# Altium schematic symbol library WR-TBL_Pluggable Connector.SchLib: 879 symbols (part 12 of 15)
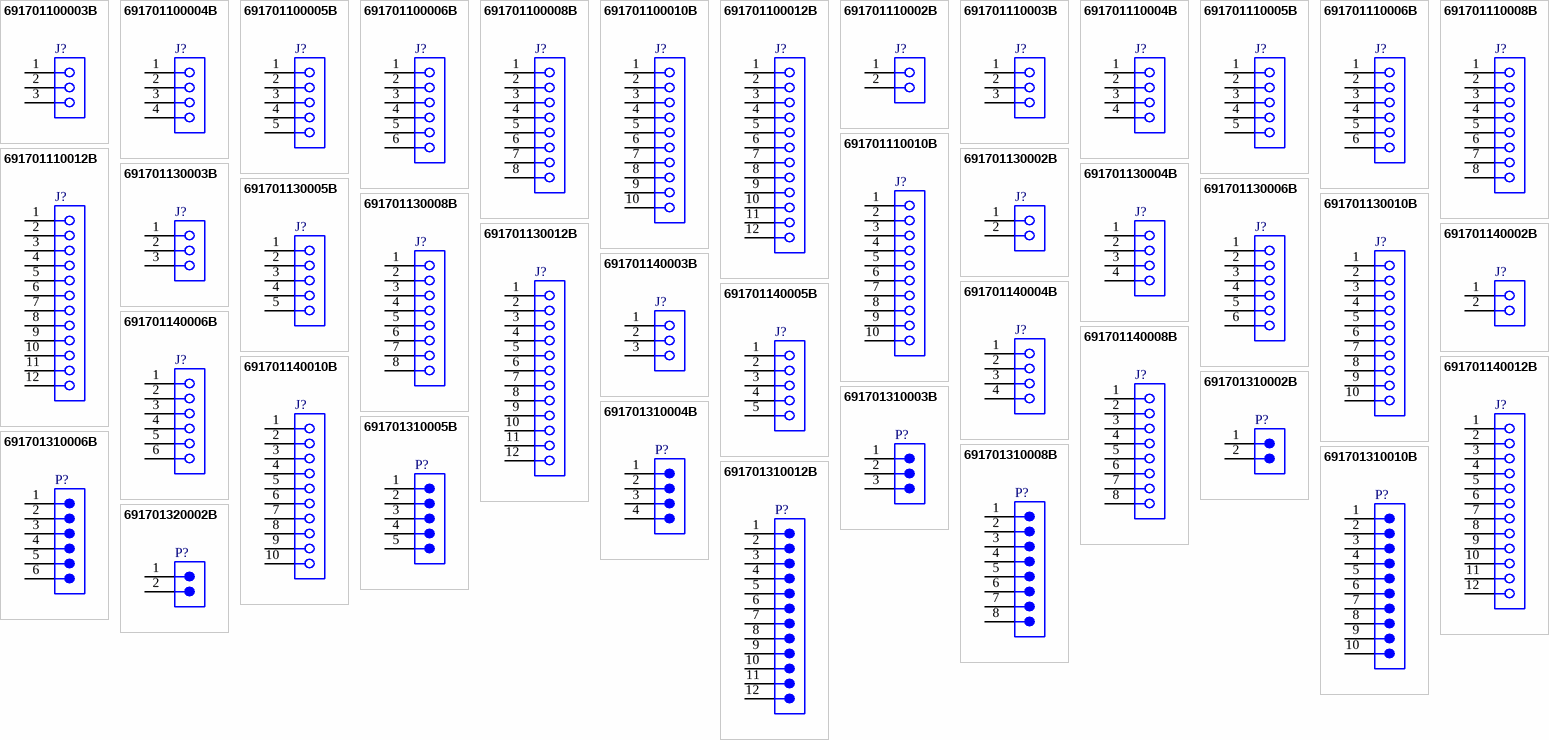
[diagram p32: symbols 691701100003B to 691701320002B]

## 691701130002B
designator J?  (value not drawn)
WR-TBL Series 7011B Vertical PCB Header with Flanges, THR, pitch 3.5mm, 02p; Manufacturer: Wurth Elektronik; Insulator Material: LCP; Rated Current (cULus): 10A; Rated Current (VDE): 8A; Working Voltage (cULus): 300V (AC); Working Voltage (VDE): 250V (AC); Withstanding Voltage (cULus): 1600V (AC); Withstanding Voltage (VDE): 1400V (AC); Manufacturer Part Number: 691701130002B; Product Series: WR-TBL; ComponentLink1Description: Website Link; ComponentLink1URL: https://www.we-online.com; ComponentLink2Description: Datasheet Link; ComponentLink2URL: https://www.we-online.com/components/products/datasheet/691701130002B; Mount: Through Hole Reflow; Operating Temperature Min: -40degC; Operating Temperature Max: 130degC; Packaging: Tape and Reel; Application: Pluggable; Number of Pins: 2; Number of Rows: 1; Orientation: Vertical; Lead Pitch: 3.5mm
footprint 691701130002B
pins: 1, 2

## 691701130003B
designator J?  (value not drawn)
WR-TBL Series 7011B Vertical PCB Header with Flanges, THR, pitch 3.5mm, 03p; Manufacturer: Wurth Elektronik; Insulator Material: LCP; Rated Current (cULus): 10A; Rated Current (VDE): 8A; Working Voltage (cULus): 300V (AC); Working Voltage (VDE): 250V (AC); Withstanding Voltage (cULus): 1600V (AC); Withstanding Voltage (VDE): 1400V (AC); Manufacturer Part Number: 691701130003B; Product Series: WR-TBL; ComponentLink1Description: Website Link; ComponentLink1URL: https://www.we-online.com; ComponentLink2Description: Datasheet Link; ComponentLink2URL: https://www.we-online.com/components/products/datasheet/691701130003B; Mount: Through Hole Reflow; Operating Temperature Min: -40degC; Operating Temperature Max: 130degC; Packaging: Tape and Reel; Application: Pluggable; Number of Pins: 3; Number of Rows: 1; Orientation: Vertical; Lead Pitch: 3.5mm
footprint 691701130003B
pins: 1, 2, 3

## 691701130004B
designator J?  (value not drawn)
WR-TBL Series 7011B Vertical PCB Header with Flanges, THR, pitch 3.5mm, 04p; Manufacturer: Wurth Elektronik; Insulator Material: LCP; Rated Current (cULus): 10A; Rated Current (VDE): 8A; Working Voltage (cULus): 300V (AC); Working Voltage (VDE): 250V (AC); Withstanding Voltage (cULus): 1600V (AC); Withstanding Voltage (VDE): 1400V (AC); Manufacturer Part Number: 691701130004B; Product Series: WR-TBL; ComponentLink1Description: Website Link; ComponentLink1URL: https://www.we-online.com; ComponentLink2Description: Datasheet Link; ComponentLink2URL: https://www.we-online.com/components/products/datasheet/691701130004B; Mount: Through Hole Reflow; Operating Temperature Min: -40degC; Operating Temperature Max: 130degC; Packaging: Tape and Reel; Application: Pluggable; Number of Pins: 4; Number of Rows: 1; Orientation: Vertical; Lead Pitch: 3.5mm
footprint 691701130004B
pins: 1, 2, 3, 4

## 691701130005B
designator J?  (value not drawn)
WR-TBL Series 7011B Vertical PCB Header with Flanges, THR, pitch 3.5mm, 05p; Manufacturer: Wurth Elektronik; Insulator Material: LCP; Rated Current (cULus): 10A; Rated Current (VDE): 8A; Working Voltage (cULus): 300V (AC); Working Voltage (VDE): 250V (AC); Withstanding Voltage (cULus): 1600V (AC); Withstanding Voltage (VDE): 1400V (AC); Manufacturer Part Number: 691701130005B; Product Series: WR-TBL; ComponentLink1Description: Website Link; ComponentLink1URL: https://www.we-online.com; ComponentLink2Description: Datasheet Link; ComponentLink2URL: https://www.we-online.com/components/products/datasheet/691701130005B; Mount: Through Hole Reflow; Operating Temperature Min: -40degC; Operating Temperature Max: 130degC; Packaging: Tape and Reel; Application: Pluggable; Number of Pins: 5; Number of Rows: 1; Orientation: Vertical; Lead Pitch: 3.5mm
footprint 691701130005B
pins: 1, 2, 3, 4, 5

## 691701130006B
designator J?  (value not drawn)
WR-TBL Series 7011B Vertical PCB Header with Flanges, THR, pitch 3.5mm, 06p; Manufacturer: Wurth Elektronik; Insulator Material: LCP; Rated Current (cULus): 10A; Rated Current (VDE): 8A; Working Voltage (cULus): 300V (AC); Working Voltage (VDE): 250V (AC); Withstanding Voltage (cULus): 1600V (AC); Withstanding Voltage (VDE): 1400V (AC); Manufacturer Part Number: 691701130006B; Product Series: WR-TBL; ComponentLink1Description: Website Link; ComponentLink1URL: https://www.we-online.com; ComponentLink2Description: Datasheet Link; ComponentLink2URL: https://www.we-online.com/components/products/datasheet/691701130006B; Mount: Through Hole Reflow; Operating Temperature Min: -40degC; Operating Temperature Max: 130degC; Packaging: Tape and Reel; Application: Pluggable; Number of Pins: 6; Number of Rows: 1; Orientation: Vertical; Lead Pitch: 3.5mm
footprint 691701130006B
pins: 1, 2, 3, 4, 5, 6

## 691701130008B
designator J?  (value not drawn)
WR-TBL Series 7011B Vertical PCB Header with Flanges, THR, pitch 3.5mm, 08p; Manufacturer: Wurth Elektronik; Insulator Material: LCP; Rated Current (cULus): 10A; Rated Current (VDE): 8A; Working Voltage (cULus): 300V (AC); Working Voltage (VDE): 250V (AC); Withstanding Voltage (cULus): 1600V (AC); Withstanding Voltage (VDE): 1400V (AC); Manufacturer Part Number: 691701130008B; Product Series: WR-TBL; ComponentLink1Description: Website Link; ComponentLink1URL: https://www.we-online.com; ComponentLink2Description: Datasheet Link; ComponentLink2URL: https://www.we-online.com/components/products/datasheet/691701130008B; Mount: Through Hole Reflow; Operating Temperature Min: -40degC; Operating Temperature Max: 130degC; Packaging: Tape and Reel; Application: Pluggable; Number of Pins: 8; Number of Rows: 1; Orientation: Vertical; Lead Pitch: 3.5mm
footprint 691701130008B
pins: 1, 2, 3, 4, 5, 6, 7, 8

## 691701130010B
designator J?  (value not drawn)
WR-TBL Series 7011B Vertical PCB Header with Flanges, THR, pitch 3.5mm, 10p; Manufacturer: Wurth Elektronik; Insulator Material: LCP; Rated Current (cULus): 10A; Rated Current (VDE): 8A; Working Voltage (cULus): 300V (AC); Working Voltage (VDE): 250V (AC); Withstanding Voltage (cULus): 1600V (AC); Withstanding Voltage (VDE): 1400V (AC); Manufacturer Part Number: 691701130010B; Product Series: WR-TBL; ComponentLink1Description: Website Link; ComponentLink1URL: https://www.we-online.com; ComponentLink2Description: Datasheet Link; ComponentLink2URL: https://www.we-online.com/components/products/datasheet/691701130010B; Mount: Through Hole Reflow; Operating Temperature Min: -40degC; Operating Temperature Max: 130degC; Packaging: Tape and Reel; Application: Pluggable; Number of Pins: 10; Number of Rows: 1; Orientation: Vertical; Lead Pitch: 3.5mm
footprint 691701130010B
pins: 1, 2, 3, 4, 5, 6, 7, 8, 9, 10

## 691701130012B
designator J?  (value not drawn)
WR-TBL Series 7011B Vertical PCB Header with Flanges, THR, pitch 3.5mm, 12p; Manufacturer: Wurth Elektronik; Insulator Material: LCP; Rated Current (cULus): 10A; Rated Current (VDE): 8A; Working Voltage (cULus): 300V (AC); Working Voltage (VDE): 250V (AC); Withstanding Voltage (cULus): 1600V (AC); Withstanding Voltage (VDE): 1400V (AC); Manufacturer Part Number: 691701130012B; Product Series: WR-TBL; ComponentLink1Description: Website Link; ComponentLink1URL: https://www.we-online.com; ComponentLink2Description: Datasheet Link; ComponentLink2URL: https://www.we-online.com/components/products/datasheet/691701130012B; Mount: Through Hole Reflow; Operating Temperature Min: -40degC; Operating Temperature Max: 130degC; Packaging: Tape and Reel; Application: Pluggable; Number of Pins: 12; Number of Rows: 1; Orientation: Vertical; Lead Pitch: 3.5mm
footprint 691701130012B
pins: 1, 2, 3, 4, 5, 6, 7, 8, 9, 10, 11, 12

## 691701140002B
designator J?  (value not drawn)
WR-TBL Series 7011B Horizontal PCB Header with Flanges, THR, pitch 3.5mm, 02p; Manufacturer: Wurth Elektronik; Insulator Material: LCP; Rated Current (cULus): 10A; Rated Current (VDE): 8A; Working Voltage (cULus): 300V (AC); Working Voltage (VDE): 250V (AC); Withstanding Voltage (cULus): 1600V (AC); Withstanding Voltage (VDE): 1400V (AC); Manufacturer Part Number: 691701140002B; Product Series: WR-TBL; ComponentLink1Description: Website Link; ComponentLink1URL: https://www.we-online.com; ComponentLink2Description: Datasheet Link; ComponentLink2URL: https://www.we-online.com/components/products/datasheet/691701140002B; Mount: Through Hole Reflow; Operating Temperature Min: -40degC; Operating Temperature Max: 130degC; Packaging: Tape and Reel; Application: Pluggable; Number of Pins: 2; Number of Rows: 1; Orientation: Horizontal; Lead Pitch: 3.5mm
footprint 691701140002B
pins: 1, 2

## 691701140003B
designator J?  (value not drawn)
WR-TBL Series 7011B Horizontal PCB Header with Flanges, THR, pitch 3.5mm, 03p; Manufacturer: Wurth Elektronik; Insulator Material: LCP; Rated Current (cULus): 10A; Rated Current (VDE): 8A; Working Voltage (cULus): 300V (AC); Working Voltage (VDE): 250V (AC); Withstanding Voltage (cULus): 1600V (AC); Withstanding Voltage (VDE): 1400V (AC); Manufacturer Part Number: 691701140003B; Product Series: WR-TBL; ComponentLink1Description: Website Link; ComponentLink1URL: https://www.we-online.com; ComponentLink2Description: Datasheet Link; ComponentLink2URL: https://www.we-online.com/components/products/datasheet/691701140003B; Mount: Through Hole Reflow; Operating Temperature Min: -40degC; Operating Temperature Max: 130degC; Packaging: Tape and Reel; Application: Pluggable; Number of Pins: 3; Number of Rows: 1; Orientation: Horizontal; Lead Pitch: 3.5mm
footprint 691701140003B
pins: 1, 2, 3

## 691701140004B
designator J?  (value not drawn)
WR-TBL Series 7011B Horizontal PCB Header with Flanges, THR, pitch 3.5mm, 04p; Manufacturer: Wurth Elektronik; Insulator Material: LCP; Rated Current (cULus): 10A; Rated Current (VDE): 8A; Working Voltage (cULus): 300V (AC); Working Voltage (VDE): 250V (AC); Withstanding Voltage (cULus): 1600V (AC); Withstanding Voltage (VDE): 1400V (AC); Manufacturer Part Number: 691701140004B; Product Series: WR-TBL; ComponentLink1Description: Website Link; ComponentLink1URL: https://www.we-online.com; ComponentLink2Description: Datasheet Link; ComponentLink2URL: https://www.we-online.com/components/products/datasheet/691701140004B; Mount: Through Hole Reflow; Operating Temperature Min: -40degC; Operating Temperature Max: 130degC; Packaging: Tape and Reel; Application: Pluggable; Number of Pins: 4; Number of Rows: 1; Orientation: Horizontal; Lead Pitch: 3.5mm
footprint 691701140004B
pins: 1, 2, 3, 4

## 691701140005B
designator J?  (value not drawn)
WR-TBL Series 7011B Horizontal PCB Header with Flanges, THR, pitch 3.5mm, 05p; Manufacturer: Wurth Elektronik; Insulator Material: LCP; Rated Current (cULus): 10A; Rated Current (VDE): 8A; Working Voltage (cULus): 300V (AC); Working Voltage (VDE): 250V (AC); Withstanding Voltage (cULus): 1600V (AC); Withstanding Voltage (VDE): 1400V (AC); Manufacturer Part Number: 691701140005B; Product Series: WR-TBL; ComponentLink1Description: Website Link; ComponentLink1URL: https://www.we-online.com; ComponentLink2Description: Datasheet Link; ComponentLink2URL: https://www.we-online.com/components/products/datasheet/691701140005B; Mount: Through Hole Reflow; Operating Temperature Min: -40degC; Operating Temperature Max: 130degC; Packaging: Tape and Reel; Application: Pluggable; Number of Pins: 5; Number of Rows: 1; Orientation: Horizontal; Lead Pitch: 3.5mm
footprint 691701140005B
pins: 1, 2, 3, 4, 5

## 691701140006B
designator J?  (value not drawn)
WR-TBL Series 7011B Horizontal PCB Header with Flanges, THR, pitch 3.5mm, 06p; Manufacturer: Wurth Elektronik; Insulator Material: LCP; Rated Current (cULus): 10A; Rated Current (VDE): 8A; Working Voltage (cULus): 300V (AC); Working Voltage (VDE): 250V (AC); Withstanding Voltage (cULus): 1600V (AC); Withstanding Voltage (VDE): 1400V (AC); Manufacturer Part Number: 691701140006B; Product Series: WR-TBL; ComponentLink1Description: Website Link; ComponentLink1URL: https://www.we-online.com; ComponentLink2Description: Datasheet Link; ComponentLink2URL: https://www.we-online.com/components/products/datasheet/691701140006B; Mount: Through Hole Reflow; Operating Temperature Min: -40degC; Operating Temperature Max: 130degC; Packaging: Tape and Reel; Application: Pluggable; Number of Pins: 6; Number of Rows: 1; Orientation: Horizontal; Lead Pitch: 3.5mm
footprint 691701140006B
pins: 1, 2, 3, 4, 5, 6

## 691701140008B
designator J?  (value not drawn)
WR-TBL Series 7011B Horizontal PCB Header with Flanges, THR, pitch 3.5mm, 08p; Manufacturer: Wurth Elektronik; Insulator Material: LCP; Rated Current (cULus): 10A; Rated Current (VDE): 8A; Working Voltage (cULus): 300V (AC); Working Voltage (VDE): 250V (AC); Withstanding Voltage (cULus): 1600V (AC); Withstanding Voltage (VDE): 1400V (AC); Manufacturer Part Number: 691701140008B; Product Series: WR-TBL; ComponentLink1Description: Website Link; ComponentLink1URL: https://www.we-online.com; ComponentLink2Description: Datasheet Link; ComponentLink2URL: https://www.we-online.com/components/products/datasheet/691701140008B; Mount: Through Hole Reflow; Operating Temperature Min: -40degC; Operating Temperature Max: 130degC; Packaging: Tape and Reel; Application: Pluggable; Number of Pins: 8; Number of Rows: 1; Orientation: Horizontal; Lead Pitch: 3.5mm
footprint 691701140008B
pins: 1, 2, 3, 4, 5, 6, 7, 8

## 691701140010B
designator J?  (value not drawn)
WR-TBL Series 7011B Horizontal PCB Header with Flanges, THR, pitch 3.5mm, 10p; Manufacturer: Wurth Elektronik; Insulator Material: LCP; Rated Current (cULus): 10A; Rated Current (VDE): 8A; Working Voltage (cULus): 300V (AC); Working Voltage (VDE): 250V (AC); Withstanding Voltage (cULus): 1600V (AC); Withstanding Voltage (VDE): 1400V (AC); Manufacturer Part Number: 691701140010B; Product Series: WR-TBL; ComponentLink1Description: Website Link; ComponentLink1URL: https://www.we-online.com; ComponentLink2Description: Datasheet Link; ComponentLink2URL: https://www.we-online.com/components/products/datasheet/691701140010B; Mount: Through Hole Reflow; Operating Temperature Min: -40degC; Operating Temperature Max: 130degC; Packaging: Tape and Reel; Application: Pluggable; Number of Pins: 10; Number of Rows: 1; Orientation: Horizontal; Lead Pitch: 3.5mm
footprint 691701140010B
pins: 1, 2, 3, 4, 5, 6, 7, 8, 9, 10

## 691701140012B
designator J?  (value not drawn)
WR-TBL Series 7011B Horizontal PCB Header with Flanges, THR, pitch 3.5mm, 12p; Manufacturer: Wurth Elektronik; Insulator Material: LCP; Rated Current (cULus): 10A; Rated Current (VDE): 8A; Working Voltage (cULus): 300V (AC); Working Voltage (VDE): 250V (AC); Withstanding Voltage (cULus): 1600V (AC); Withstanding Voltage (VDE): 1400V (AC); Manufacturer Part Number: 691701140012B; Product Series: WR-TBL; ComponentLink1Description: Website Link; ComponentLink1URL: https://www.we-online.com; ComponentLink2Description: Datasheet Link; ComponentLink2URL: https://www.we-online.com/components/products/datasheet/691701140012B; Mount: Through Hole Reflow; Operating Temperature Min: -40degC; Operating Temperature Max: 130degC; Packaging: Tape and Reel; Application: Pluggable; Number of Pins: 12; Number of Rows: 1; Orientation: Horizontal; Lead Pitch: 3.5mm
footprint 691701140012B
pins: 1, 2, 3, 4, 5, 6, 7, 8, 9, 10, 11, 12

## 691701310002B
designator P?  (value not drawn)
WR-TBL Series 7013B Vertical PCB Header, SMT, pitch 3.81mm, 02p; Manufacturer: Wurth Elektronik; Insulator Material: LCP; Modularity: No; Rated Current (cULus): 10A; Rated Current (VDE): 8A; Working Voltage (cULus): 300V (AC); Working Voltage (VDE): 250V (AC); Withstanding Voltage (cULus): 1600V (AC); Withstanding Voltage (VDE): 1400V (AC); Manufacturer Part Number: 691701310002B; Product Series: WR-TBL; ComponentLink1Description: Website Link; ComponentLink1URL: https://www.we-online.com; ComponentLink2Description: Datasheet Link; ComponentLink2URL: https://www.we-online.com/components/products/datasheet/691701310002B; Mount: Surface Mount; Operating Temperature Min: -40degC; Operating Temperature Max: 130degC; Packaging: Box; Application: Pluggable; Number of Pins: 2; Number of Rows: 1; Orientation: Vertical; Lead Pitch: 3.81mm
footprint 691701310002B
pins: 1, 2

## 691701310003B
designator P?  (value not drawn)
WR-TBL Series 7013B Vertical PCB Header, SMT, pitch 3.81mm, 03p; Manufacturer: Wurth Elektronik; Insulator Material: LCP; Modularity: No; Rated Current (cULus): 10A; Rated Current (VDE): 8A; Working Voltage (cULus): 300V (AC); Working Voltage (VDE): 250V (AC); Withstanding Voltage (cULus): 1600V (AC); Withstanding Voltage (VDE): 1400V (AC); Manufacturer Part Number: 691701310003B; Product Series: WR-TBL; ComponentLink1Description: Website Link; ComponentLink1URL: https://www.we-online.com; ComponentLink2Description: Datasheet Link; ComponentLink2URL: https://www.we-online.com/components/products/datasheet/691701310003B; Mount: Surface Mount; Operating Temperature Min: -40degC; Operating Temperature Max: 130degC; Packaging: Box; Application: Pluggable; Number of Pins: 3; Number of Rows: 1; Orientation: Vertical; Lead Pitch: 3.81mm
footprint 691701310003B
pins: 1, 2, 3

## 691701310004B
designator P?  (value not drawn)
WR-TBL Series 7013B Vertical PCB Header, SMT, pitch 3.81mm, 04p; Manufacturer: Wurth Elektronik; Insulator Material: LCP; Modularity: No; Rated Current (cULus): 10A; Rated Current (VDE): 8A; Working Voltage (cULus): 300V (AC); Working Voltage (VDE): 250V (AC); Withstanding Voltage (cULus): 1600V (AC); Withstanding Voltage (VDE): 1400V (AC); Manufacturer Part Number: 691701310004B; Product Series: WR-TBL; ComponentLink1Description: Website Link; ComponentLink1URL: https://www.we-online.com; ComponentLink2Description: Datasheet Link; ComponentLink2URL: https://www.we-online.com/components/products/datasheet/691701310004B; Mount: Surface Mount; Operating Temperature Min: -40degC; Operating Temperature Max: 130degC; Packaging: Box; Application: Pluggable; Number of Pins: 4; Number of Rows: 1; Orientation: Vertical; Lead Pitch: 3.81mm
footprint 691701310004B
pins: 1, 2, 3, 4

## 691701310005B
designator P?  (value not drawn)
WR-TBL Series 7013B Vertical PCB Header, SMT, pitch 3.81mm, 05p; Manufacturer: Wurth Elektronik; Insulator Material: LCP; Modularity: No; Rated Current (cULus): 10A; Rated Current (VDE): 8A; Working Voltage (cULus): 300V (AC); Working Voltage (VDE): 250V (AC); Withstanding Voltage (cULus): 1600V (AC); Withstanding Voltage (VDE): 1400V (AC); Manufacturer Part Number: 691701310005B; Product Series: WR-TBL; ComponentLink1Description: Website Link; ComponentLink1URL: https://www.we-online.com; ComponentLink2Description: Datasheet Link; ComponentLink2URL: https://www.we-online.com/components/products/datasheet/691701310005B; Mount: Surface Mount; Operating Temperature Min: -40degC; Operating Temperature Max: 130degC; Packaging: Box; Application: Pluggable; Number of Pins: 5; Number of Rows: 1; Orientation: Vertical; Lead Pitch: 3.81mm
footprint 691701310005B
pins: 1, 2, 3, 4, 5

## 691701310006B
designator P?  (value not drawn)
WR-TBL Series 7013B Vertical PCB Header, SMT, pitch 3.81mm, 06p; Manufacturer: Wurth Elektronik; Insulator Material: LCP; Modularity: No; Rated Current (cULus): 10A; Rated Current (VDE): 8A; Working Voltage (cULus): 300V (AC); Working Voltage (VDE): 250V (AC); Withstanding Voltage (cULus): 1600V (AC); Withstanding Voltage (VDE): 1400V (AC); Manufacturer Part Number: 691701310006B; Product Series: WR-TBL; ComponentLink1Description: Website Link; ComponentLink1URL: https://www.we-online.com; ComponentLink2Description: Datasheet Link; ComponentLink2URL: https://www.we-online.com/components/products/datasheet/691701310006B; Mount: Surface Mount; Operating Temperature Min: -40degC; Operating Temperature Max: 130degC; Packaging: Box; Application: Pluggable; Number of Pins: 6; Number of Rows: 1; Orientation: Vertical; Lead Pitch: 3.81mm
footprint 691701310006B
pins: 1, 2, 3, 4, 5, 6

## 691701310008B
designator P?  (value not drawn)
WR-TBL Series 7013B Vertical PCB Header, SMT, pitch 3.81mm, 08p; Manufacturer: Wurth Elektronik; Insulator Material: LCP; Modularity: No; Rated Current (cULus): 10A; Rated Current (VDE): 8A; Working Voltage (cULus): 300V (AC); Working Voltage (VDE): 250V (AC); Withstanding Voltage (cULus): 1600V (AC); Withstanding Voltage (VDE): 1400V (AC); Manufacturer Part Number: 691701310008B; Product Series: WR-TBL; ComponentLink1Description: Website Link; ComponentLink1URL: https://www.we-online.com; ComponentLink2Description: Datasheet Link; ComponentLink2URL: https://www.we-online.com/components/products/datasheet/691701310008B; Mount: Surface Mount; Operating Temperature Min: -40degC; Operating Temperature Max: 130degC; Packaging: Box; Application: Pluggable; Number of Pins: 8; Number of Rows: 1; Orientation: Vertical; Lead Pitch: 3.81mm
footprint 691701310008B
pins: 1, 2, 3, 4, 5, 6, 7, 8

## 691701310010B
designator P?  (value not drawn)
WR-TBL Series 7013B Vertical PCB Header, SMT, pitch 3.81mm, 10p; Manufacturer: Wurth Elektronik; Insulator Material: LCP; Modularity: No; Rated Current (cULus): 10A; Rated Current (VDE): 8A; Working Voltage (cULus): 300V (AC); Working Voltage (VDE): 250V (AC); Withstanding Voltage (cULus): 1600V (AC); Withstanding Voltage (VDE): 1400V (AC); Manufacturer Part Number: 691701310010B; Product Series: WR-TBL; ComponentLink1Description: Website Link; ComponentLink1URL: https://www.we-online.com; ComponentLink2Description: Datasheet Link; ComponentLink2URL: https://www.we-online.com/components/products/datasheet/691701310010B; Mount: Surface Mount; Operating Temperature Min: -40degC; Operating Temperature Max: 130degC; Packaging: Box; Application: Pluggable; Number of Pins: 10; Number of Rows: 1; Orientation: Vertical; Lead Pitch: 3.81mm
footprint 691701310010B
pins: 1, 2, 3, 4, 5, 6, 7, 8, 9, 10

## 691701310012B
designator P?  (value not drawn)
WR-TBL Series 7013B Vertical PCB Header, SMT, pitch 3.81mm, 12p; Manufacturer: Wurth Elektronik; Insulator Material: LCP; Modularity: No; Rated Current (cULus): 10A; Rated Current (VDE): 8A; Working Voltage (cULus): 300V (AC); Working Voltage (VDE): 250V (AC); Withstanding Voltage (cULus): 1600V (AC); Withstanding Voltage (VDE): 1400V (AC); Manufacturer Part Number: 691701310012B; Product Series: WR-TBL; ComponentLink1Description: Website Link; ComponentLink1URL: https://www.we-online.com; ComponentLink2Description: Datasheet Link; ComponentLink2URL: https://www.we-online.com/components/products/datasheet/691701310012B; Mount: Surface Mount; Operating Temperature Min: -40degC; Operating Temperature Max: 130degC; Packaging: Box; Application: Pluggable; Number of Pins: 12; Number of Rows: 1; Orientation: Vertical; Lead Pitch: 3.81mm
footprint 691701310012B
pins: 1, 2, 3, 4, 5, 6, 7, 8, 9, 10, 11, 12

## 691701320002B
designator P?  (value not drawn)
WR-TBL Series 7013 Vertical PCB Header with Flanges, SMT, pitch 3.81mm, 02p; Manufacturer: Wurth Elektronik; Insulator Material: LCP; Modularity: No; Rated Current (cULus): 10A; Rated Current (VDE): 8A; Working Voltage (cULus): 300V (AC); Working Voltage (VDE): 250V (AC); Withstanding Voltage (cULus): 1600V (AC); Withstanding Voltage (VDE): 1400V (AC); Manufacturer Part Number: 691701320002B; Product Series: WR-TBL; ComponentLink1Description: Website Link; ComponentLink1URL: https://www.we-online.com; ComponentLink2Description: Datasheet Link; ComponentLink2URL: https://www.we-online.com/components/products/datasheet/691701320002B; Mount: Surface Mount; Operating Temperature Min: -40degC; Operating Temperature Max: 130degC; Packaging: Box; Application: Pluggable; Number of Pins: 2; Number of Rows: 1; Orientation: Vertical; Lead Pitch: 3.81mm
footprint 691701320002B
pins: 1, 2

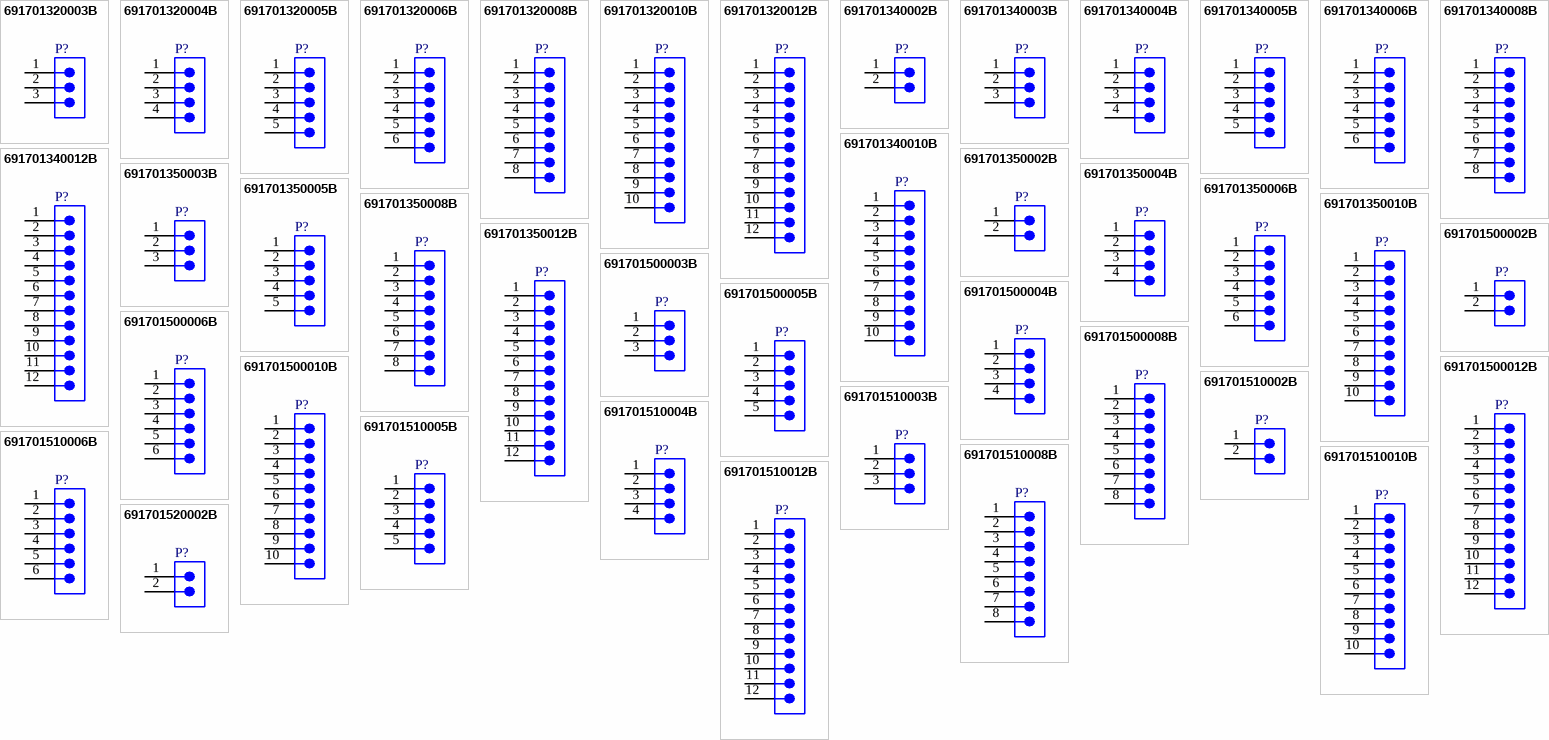
[diagram p18: symbols 691701320003B to 691701520002B]

## 691701320003B
designator P?  (value not drawn)
WR-TBL Series 7013 Vertical PCB Header with Flanges, SMT, pitch 3.81mm, 03p; Manufacturer: Wurth Elektronik; Insulator Material: LCP; Modularity: No; Rated Current (cULus): 10A; Rated Current (VDE): 8A; Working Voltage (cULus): 300V (AC); Working Voltage (VDE): 250V (AC); Withstanding Voltage (cULus): 1600V (AC); Withstanding Voltage (VDE): 1400V (AC); Manufacturer Part Number: 691701320003B; Product Series: WR-TBL; ComponentLink1Description: Website Link; ComponentLink1URL: https://www.we-online.com; ComponentLink2Description: Datasheet Link; ComponentLink2URL: https://www.we-online.com/components/products/datasheet/691701320003B; Mount: Surface Mount; Operating Temperature Min: -40degC; Operating Temperature Max: 130degC; Packaging: Box; Application: Pluggable; Number of Pins: 3; Number of Rows: 1; Orientation: Vertical; Lead Pitch: 3.81mm
footprint 691701320003B
pins: 1, 2, 3

## 691701320004B
designator P?  (value not drawn)
WR-TBL Series 7013 Vertical PCB Header with Flanges, SMT, pitch 3.81mm, 04p; Manufacturer: Wurth Elektronik; Insulator Material: LCP; Modularity: No; Rated Current (cULus): 10A; Rated Current (VDE): 8A; Working Voltage (cULus): 300V (AC); Working Voltage (VDE): 250V (AC); Withstanding Voltage (cULus): 1600V (AC); Withstanding Voltage (VDE): 1400V (AC); Manufacturer Part Number: 691701320004B; Product Series: WR-TBL; ComponentLink1Description: Website Link; ComponentLink1URL: https://www.we-online.com; ComponentLink2Description: Datasheet Link; ComponentLink2URL: https://www.we-online.com/components/products/datasheet/691701320004B; Mount: Surface Mount; Operating Temperature Min: -40degC; Operating Temperature Max: 130degC; Packaging: Box; Application: Pluggable; Number of Pins: 4; Number of Rows: 1; Orientation: Vertical; Lead Pitch: 3.81mm
footprint 691701320004B
pins: 1, 2, 3, 4

## 691701320005B
designator P?  (value not drawn)
WR-TBL Series 7013 Vertical PCB Header with Flanges, SMT, pitch 3.81mm, 05p; Manufacturer: Wurth Elektronik; Insulator Material: LCP; Modularity: No; Rated Current (cULus): 10A; Rated Current (VDE): 8A; Working Voltage (cULus): 300V (AC); Working Voltage (VDE): 250V (AC); Withstanding Voltage (cULus): 1600V (AC); Withstanding Voltage (VDE): 1400V (AC); Manufacturer Part Number: 691701320005B; Product Series: WR-TBL; ComponentLink1Description: Website Link; ComponentLink1URL: https://www.we-online.com; ComponentLink2Description: Datasheet Link; ComponentLink2URL: https://www.we-online.com/components/products/datasheet/691701320005B; Mount: Surface Mount; Operating Temperature Min: -40degC; Operating Temperature Max: 130degC; Packaging: Box; Application: Pluggable; Number of Pins: 5; Number of Rows: 1; Orientation: Vertical; Lead Pitch: 3.81mm
footprint 691701320005B
pins: 1, 2, 3, 4, 5

## 691701320006B
designator P?  (value not drawn)
WR-TBL Series 7013 Vertical PCB Header with Flanges, SMT, pitch 3.81mm, 06p; Manufacturer: Wurth Elektronik; Insulator Material: LCP; Modularity: No; Rated Current (cULus): 10A; Rated Current (VDE): 8A; Working Voltage (cULus): 300V (AC); Working Voltage (VDE): 250V (AC); Withstanding Voltage (cULus): 1600V (AC); Withstanding Voltage (VDE): 1400V (AC); Manufacturer Part Number: 691701320006B; Product Series: WR-TBL; ComponentLink1Description: Website Link; ComponentLink1URL: https://www.we-online.com; ComponentLink2Description: Datasheet Link; ComponentLink2URL: https://www.we-online.com/components/products/datasheet/691701320006B; Mount: Surface Mount; Operating Temperature Min: -40degC; Operating Temperature Max: 130degC; Packaging: Box; Application: Pluggable; Number of Pins: 6; Number of Rows: 1; Orientation: Vertical; Lead Pitch: 3.81mm
footprint 691701320006B
pins: 1, 2, 3, 4, 5, 6

## 691701320008B
designator P?  (value not drawn)
WR-TBL Series 7013 Vertical PCB Header with Flanges, SMT, pitch 3.81mm, 08p; Manufacturer: Wurth Elektronik; Insulator Material: LCP; Modularity: No; Rated Current (cULus): 10A; Rated Current (VDE): 8A; Working Voltage (cULus): 300V (AC); Working Voltage (VDE): 250V (AC); Withstanding Voltage (cULus): 1600V (AC); Withstanding Voltage (VDE): 1400V (AC); Manufacturer Part Number: 691701320008B; Product Series: WR-TBL; ComponentLink1Description: Website Link; ComponentLink1URL: https://www.we-online.com; ComponentLink2Description: Datasheet Link; ComponentLink2URL: https://www.we-online.com/components/products/datasheet/691701320008B; Mount: Surface Mount; Operating Temperature Min: -40degC; Operating Temperature Max: 130degC; Packaging: Box; Application: Pluggable; Number of Pins: 8; Number of Rows: 1; Orientation: Vertical; Lead Pitch: 3.81mm
footprint 691701320008B
pins: 1, 2, 3, 4, 5, 6, 7, 8

## 691701320010B
designator P?  (value not drawn)
WR-TBL Series 7013 Vertical PCB Header with Flanges, SMT, pitch 3.81mm, 10p; Manufacturer: Wurth Elektronik; Insulator Material: LCP; Modularity: No; Rated Current (cULus): 10A; Rated Current (VDE): 8A; Working Voltage (cULus): 300V (AC); Working Voltage (VDE): 250V (AC); Withstanding Voltage (cULus): 1600V (AC); Withstanding Voltage (VDE): 1400V (AC); Manufacturer Part Number: 691701320010B; Product Series: WR-TBL; ComponentLink1Description: Website Link; ComponentLink1URL: https://www.we-online.com; ComponentLink2Description: Datasheet Link; ComponentLink2URL: https://www.we-online.com/components/products/datasheet/691701320010B; Mount: Surface Mount; Operating Temperature Min: -40degC; Operating Temperature Max: 130degC; Packaging: Box; Application: Pluggable; Number of Pins: 10; Number of Rows: 1; Orientation: Vertical; Lead Pitch: 3.81mm
footprint 691701320010B
pins: 1, 2, 3, 4, 5, 6, 7, 8, 9, 10

## 691701320012B
designator P?  (value not drawn)
WR-TBL Series 7013 Vertical PCB Header with Flanges, SMT, pitch 3.81mm, 12p; Manufacturer: Wurth Elektronik; Insulator Material: LCP; Modularity: No; Rated Current (cULus): 10A; Rated Current (VDE): 8A; Working Voltage (cULus): 300V (AC); Working Voltage (VDE): 250V (AC); Withstanding Voltage (cULus): 1600V (AC); Withstanding Voltage (VDE): 1400V (AC); Manufacturer Part Number: 691701320012B; Product Series: WR-TBL; ComponentLink1Description: Website Link; ComponentLink1URL: https://www.we-online.com; ComponentLink2Description: Datasheet Link; ComponentLink2URL: https://www.we-online.com/components/products/datasheet/691701320012B; Mount: Surface Mount; Operating Temperature Min: -40degC; Operating Temperature Max: 130degC; Packaging: Box; Application: Pluggable; Number of Pins: 12; Number of Rows: 1; Orientation: Vertical; Lead Pitch: 3.81mm
footprint 691701320012B
pins: 1, 2, 3, 4, 5, 6, 7, 8, 9, 10, 11, 12

## 691701340002B
designator P?  (value not drawn)
WR-TBL Series 7013 Horizontal PCB Header, SMT, pitch 3.81mm, 02p; Manufacturer: Wurth Elektronik; Insulator Material: LCP; Modularity: No; Rated Current (cULus): 10A; Rated Current (VDE): 8A; Working Voltage (cULus): 300V (AC); Working Voltage (VDE): 250V (AC); Withstanding Voltage (cULus): 1600V (AC); Withstanding Voltage (VDE): 1400V (AC); Manufacturer Part Number: 691701340002B; Product Series: WR-TBL; ComponentLink1Description: Website Link; ComponentLink1URL: https://www.we-online.com; ComponentLink2Description: Datasheet Link; ComponentLink2URL: https://www.we-online.com/components/products/datasheet/691701340002B; Mount: Surface Mount; Operating Temperature Min: -40degC; Operating Temperature Max: 130degC; Packaging: Box; Application: Pluggable; Number of Pins: 2; Number of Rows: 1; Orientation: Horizontal; Lead Pitch: 3.81mm
footprint 691701340002B
pins: 1, 2

## 691701340003B
designator P?  (value not drawn)
WR-TBL Series 7013 Horizontal PCB Header, SMT, pitch 3.81mm, 03p; Manufacturer: Wurth Elektronik; Insulator Material: LCP; Modularity: No; Rated Current (cULus): 10A; Rated Current (VDE): 8A; Working Voltage (cULus): 300V (AC); Working Voltage (VDE): 250V (AC); Withstanding Voltage (cULus): 1600V (AC); Withstanding Voltage (VDE): 1400V (AC); Manufacturer Part Number: 691701340003B; Product Series: WR-TBL; ComponentLink1Description: Website Link; ComponentLink1URL: https://www.we-online.com; ComponentLink2Description: Datasheet Link; ComponentLink2URL: https://www.we-online.com/components/products/datasheet/691701340003B; Mount: Surface Mount; Operating Temperature Min: -40degC; Operating Temperature Max: 130degC; Packaging: Box; Application: Pluggable; Number of Pins: 3; Number of Rows: 1; Orientation: Horizontal; Lead Pitch: 3.81mm
footprint 691701340003B
pins: 1, 2, 3

## 691701340004B
designator P?  (value not drawn)
WR-TBL Series 7013 Horizontal PCB Header, SMT, pitch 3.81mm, 04p; Manufacturer: Wurth Elektronik; Insulator Material: LCP; Modularity: No; Rated Current (cULus): 10A; Rated Current (VDE): 8A; Working Voltage (cULus): 300V (AC); Working Voltage (VDE): 250V (AC); Withstanding Voltage (cULus): 1600V (AC); Withstanding Voltage (VDE): 1400V (AC); Manufacturer Part Number: 691701340004B; Product Series: WR-TBL; ComponentLink1Description: Website Link; ComponentLink1URL: https://www.we-online.com; ComponentLink2Description: Datasheet Link; ComponentLink2URL: https://www.we-online.com/components/products/datasheet/691701340004B; Mount: Surface Mount; Operating Temperature Min: -40degC; Operating Temperature Max: 130degC; Packaging: Box; Application: Pluggable; Number of Pins: 4; Number of Rows: 1; Orientation: Horizontal; Lead Pitch: 3.81mm
footprint 691701340004B
pins: 1, 2, 3, 4

## 691701340005B
designator P?  (value not drawn)
WR-TBL Series 7013 Horizontal PCB Header, SMT, pitch 3.81mm, 05p; Manufacturer: Wurth Elektronik; Insulator Material: LCP; Modularity: No; Rated Current (cULus): 10A; Rated Current (VDE): 8A; Working Voltage (cULus): 300V (AC); Working Voltage (VDE): 250V (AC); Withstanding Voltage (cULus): 1600V (AC); Withstanding Voltage (VDE): 1400V (AC); Manufacturer Part Number: 691701340005B; Product Series: WR-TBL; ComponentLink1Description: Website Link; ComponentLink1URL: https://www.we-online.com; ComponentLink2Description: Datasheet Link; ComponentLink2URL: https://www.we-online.com/components/products/datasheet/691701340005B; Mount: Surface Mount; Operating Temperature Min: -40degC; Operating Temperature Max: 130degC; Packaging: Box; Application: Pluggable; Number of Pins: 5; Number of Rows: 1; Orientation: Horizontal; Lead Pitch: 3.81mm
footprint 691701340005B
pins: 1, 2, 3, 4, 5

## 691701340006B
designator P?  (value not drawn)
WR-TBL Series 7013 Horizontal PCB Header, SMT, pitch 3.81mm, 06p; Manufacturer: Wurth Elektronik; Insulator Material: LCP; Modularity: No; Rated Current (cULus): 10A; Rated Current (VDE): 8A; Working Voltage (cULus): 300V (AC); Working Voltage (VDE): 250V (AC); Withstanding Voltage (cULus): 1600V (AC); Withstanding Voltage (VDE): 1400V (AC); Manufacturer Part Number: 691701340006B; Product Series: WR-TBL; ComponentLink1Description: Website Link; ComponentLink1URL: https://www.we-online.com; ComponentLink2Description: Datasheet Link; ComponentLink2URL: https://www.we-online.com/components/products/datasheet/691701340006B; Mount: Surface Mount; Operating Temperature Min: -40degC; Operating Temperature Max: 130degC; Packaging: Box; Application: Pluggable; Number of Pins: 6; Number of Rows: 1; Orientation: Horizontal; Lead Pitch: 3.81mm
footprint 691701340006B
pins: 1, 2, 3, 4, 5, 6

## 691701340008B
designator P?  (value not drawn)
WR-TBL Series 7013 Horizontal PCB Header, SMT, pitch 3.81mm, 08p; Manufacturer: Wurth Elektronik; Insulator Material: LCP; Modularity: No; Rated Current (cULus): 10A; Rated Current (VDE): 8A; Working Voltage (cULus): 300V (AC); Working Voltage (VDE): 250V (AC); Withstanding Voltage (cULus): 1600V (AC); Withstanding Voltage (VDE): 1400V (AC); Manufacturer Part Number: 691701340008B; Product Series: WR-TBL; ComponentLink1Description: Website Link; ComponentLink1URL: https://www.we-online.com; ComponentLink2Description: Datasheet Link; ComponentLink2URL: https://www.we-online.com/components/products/datasheet/691701340008B; Mount: Surface Mount; Operating Temperature Min: -40degC; Operating Temperature Max: 130degC; Packaging: Box; Application: Pluggable; Number of Pins: 8; Number of Rows: 1; Orientation: Horizontal; Lead Pitch: 3.81mm
footprint 691701340008B
pins: 1, 2, 3, 4, 5, 6, 7, 8

## 691701340010B
designator P?  (value not drawn)
WR-TBL Series 7013 Horizontal PCB Header, SMT, pitch 3.81mm, 10p; Manufacturer: Wurth Elektronik; Insulator Material: LCP; Modularity: No; Rated Current (cULus): 10A; Rated Current (VDE): 8A; Working Voltage (cULus): 300V (AC); Working Voltage (VDE): 250V (AC); Withstanding Voltage (cULus): 1600V (AC); Withstanding Voltage (VDE): 1400V (AC); Manufacturer Part Number: 691701340010B; Product Series: WR-TBL; ComponentLink1Description: Website Link; ComponentLink1URL: https://www.we-online.com; ComponentLink2Description: Datasheet Link; ComponentLink2URL: https://www.we-online.com/components/products/datasheet/691701340010B; Mount: Surface Mount; Operating Temperature Min: -40degC; Operating Temperature Max: 130degC; Packaging: Box; Application: Pluggable; Number of Pins: 10; Number of Rows: 1; Orientation: Horizontal; Lead Pitch: 3.81mm
footprint 691701340010B
pins: 1, 2, 3, 4, 5, 6, 7, 8, 9, 10

## 691701340012B
designator P?  (value not drawn)
WR-TBL Series 7013 Horizontal PCB Header, SMT, pitch 3.81mm, 12p; Manufacturer: Wurth Elektronik; Insulator Material: LCP; Modularity: No; Rated Current (cULus): 10A; Rated Current (VDE): 8A; Working Voltage (cULus): 300V (AC); Working Voltage (VDE): 250V (AC); Withstanding Voltage (cULus): 1600V (AC); Withstanding Voltage (VDE): 1400V (AC); Manufacturer Part Number: 691701340012B; Product Series: WR-TBL; ComponentLink1Description: Website Link; ComponentLink1URL: https://www.we-online.com; ComponentLink2Description: Datasheet Link; ComponentLink2URL: https://www.we-online.com/components/products/datasheet/691701340012B; Mount: Surface Mount; Operating Temperature Min: -40degC; Operating Temperature Max: 130degC; Packaging: Box; Application: Pluggable; Number of Pins: 12; Number of Rows: 1; Orientation: Horizontal; Lead Pitch: 3.81mm
footprint 691701340012B
pins: 1, 2, 3, 4, 5, 6, 7, 8, 9, 10, 11, 12

## 691701350002B
designator P?  (value not drawn)
WR-TBL Series 7013 Horizontal PCB Header with Flanges, SMT, pitch 3.81mm, 02p; Manufacturer: Wurth Elektronik; Insulator Material: LCP; Modularity: No; Rated Current (cULus): 10A; Rated Current (VDE): 8A; Working Voltage (cULus): 300V (AC); Working Voltage (VDE): 250V (AC); Withstanding Voltage (cULus): 1600V (AC); Withstanding Voltage (VDE): 1400V (AC); Manufacturer Part Number: 691701350002B; Product Series: WR-TBL; ComponentLink1Description: Website Link; ComponentLink1URL: https://www.we-online.com; ComponentLink2Description: Datasheet Link; ComponentLink2URL: https://www.we-online.com/components/products/datasheet/691701350002B; Mount: Surface Mount; Operating Temperature Min: -40degC; Operating Temperature Max: 130degC; Packaging: Box; Application: Pluggable; Number of Pins: 2; Number of Rows: 1; Orientation: Horizontal; Lead Pitch: 3.81mm
footprint 691701350002B
pins: 1, 2

## 691701350003B
designator P?  (value not drawn)
WR-TBL Series 7013 Horizontal PCB Header with Flanges, SMT, pitch 3.81mm, 03p; Manufacturer: Wurth Elektronik; Insulator Material: LCP; Modularity: No; Rated Current (cULus): 10A; Rated Current (VDE): 8A; Working Voltage (cULus): 300V (AC); Working Voltage (VDE): 250V (AC); Withstanding Voltage (cULus): 1600V (AC); Withstanding Voltage (VDE): 1400V (AC); Manufacturer Part Number: 691701350003B; Product Series: WR-TBL; ComponentLink1Description: Website Link; ComponentLink1URL: https://www.we-online.com; ComponentLink2Description: Datasheet Link; ComponentLink2URL: https://www.we-online.com/components/products/datasheet/691701350003B; Mount: Surface Mount; Operating Temperature Min: -40degC; Operating Temperature Max: 130degC; Packaging: Box; Application: Pluggable; Number of Pins: 3; Number of Rows: 1; Orientation: Horizontal; Lead Pitch: 3.81mm
footprint 691701350003B
pins: 1, 2, 3

## 691701350004B
designator P?  (value not drawn)
WR-TBL Series 7013 Horizontal PCB Header with Flanges, SMT, pitch 3.81mm, 04p; Manufacturer: Wurth Elektronik; Insulator Material: LCP; Modularity: No; Rated Current (cULus): 10A; Rated Current (VDE): 8A; Working Voltage (cULus): 300V (AC); Working Voltage (VDE): 250V (AC); Withstanding Voltage (cULus): 1600V (AC); Withstanding Voltage (VDE): 1400V (AC); Manufacturer Part Number: 691701350004B; Product Series: WR-TBL; ComponentLink1Description: Website Link; ComponentLink1URL: https://www.we-online.com; ComponentLink2Description: Datasheet Link; ComponentLink2URL: https://www.we-online.com/components/products/datasheet/691701350004B; Mount: Surface Mount; Operating Temperature Min: -40degC; Operating Temperature Max: 130degC; Packaging: Box; Application: Pluggable; Number of Pins: 4; Number of Rows: 1; Orientation: Horizontal; Lead Pitch: 3.81mm
footprint 691701350004B
pins: 1, 2, 3, 4

## 691701350005B
designator P?  (value not drawn)
WR-TBL Series 7013 Horizontal PCB Header with Flanges, SMT, pitch 3.81mm, 05p; Manufacturer: Wurth Elektronik; Insulator Material: LCP; Modularity: No; Rated Current (cULus): 10A; Rated Current (VDE): 8A; Working Voltage (cULus): 300V (AC); Working Voltage (VDE): 250V (AC); Withstanding Voltage (cULus): 1600V (AC); Withstanding Voltage (VDE): 1400V (AC); Manufacturer Part Number: 691701350005B; Product Series: WR-TBL; ComponentLink1Description: Website Link; ComponentLink1URL: https://www.we-online.com; ComponentLink2Description: Datasheet Link; ComponentLink2URL: https://www.we-online.com/components/products/datasheet/691701350005B; Mount: Surface Mount; Operating Temperature Min: -40degC; Operating Temperature Max: 130degC; Packaging: Box; Application: Pluggable; Number of Pins: 5; Number of Rows: 1; Orientation: Horizontal; Lead Pitch: 3.81mm
footprint 691701350005B
pins: 1, 2, 3, 4, 5

## 691701350006B
designator P?  (value not drawn)
WR-TBL Series 7013 Horizontal PCB Header with Flanges, SMT, pitch 3.81mm, 06p; Manufacturer: Wurth Elektronik; Insulator Material: LCP; Modularity: No; Rated Current (cULus): 10A; Rated Current (VDE): 8A; Working Voltage (cULus): 300V (AC); Working Voltage (VDE): 250V (AC); Withstanding Voltage (cULus): 1600V (AC); Withstanding Voltage (VDE): 1400V (AC); Manufacturer Part Number: 691701350006B; Product Series: WR-TBL; ComponentLink1Description: Website Link; ComponentLink1URL: https://www.we-online.com; ComponentLink2Description: Datasheet Link; ComponentLink2URL: https://www.we-online.com/components/products/datasheet/691701350006B; Mount: Surface Mount; Operating Temperature Min: -40degC; Operating Temperature Max: 130degC; Packaging: Box; Application: Pluggable; Number of Pins: 6; Number of Rows: 1; Orientation: Horizontal; Lead Pitch: 3.81mm
footprint 691701350006B
pins: 1, 2, 3, 4, 5, 6

## 691701350008B
designator P?  (value not drawn)
WR-TBL Series 7013 Horizontal PCB Header with Flanges, SMT, pitch 3.81mm, 08p; Manufacturer: Wurth Elektronik; Insulator Material: LCP; Modularity: No; Rated Current (cULus): 10A; Rated Current (VDE): 8A; Working Voltage (cULus): 300V (AC); Working Voltage (VDE): 250V (AC); Withstanding Voltage (cULus): 1600V (AC); Withstanding Voltage (VDE): 1400V (AC); Manufacturer Part Number: 691701350008B; Product Series: WR-TBL; ComponentLink1Description: Website Link; ComponentLink1URL: https://www.we-online.com; ComponentLink2Description: Datasheet Link; ComponentLink2URL: https://www.we-online.com/components/products/datasheet/691701350008B; Mount: Surface Mount; Operating Temperature Min: -40degC; Operating Temperature Max: 130degC; Packaging: Box; Application: Pluggable; Number of Pins: 8; Number of Rows: 1; Orientation: Horizontal; Lead Pitch: 3.81mm
footprint 691701350008B
pins: 1, 2, 3, 4, 5, 6, 7, 8

## 691701350010B
designator P?  (value not drawn)
WR-TBL Series 7013 Horizontal PCB Header with Flanges, SMT, pitch 3.81mm, 10p; Manufacturer: Wurth Elektronik; Insulator Material: LCP; Modularity: No; Rated Current (cULus): 10A; Rated Current (VDE): 8A; Working Voltage (cULus): 300V (AC); Working Voltage (VDE): 250V (AC); Withstanding Voltage (cULus): 1600V (AC); Withstanding Voltage (VDE): 1400V (AC); Manufacturer Part Number: 691701350010B; Product Series: WR-TBL; ComponentLink1Description: Website Link; ComponentLink1URL: https://www.we-online.com; ComponentLink2Description: Datasheet Link; ComponentLink2URL: https://www.we-online.com/components/products/datasheet/691701350010B; Mount: Surface Mount; Operating Temperature Min: -40degC; Operating Temperature Max: 130degC; Packaging: Box; Application: Pluggable; Number of Pins: 10; Number of Rows: 1; Orientation: Horizontal; Lead Pitch: 3.81mm
footprint 691701350010B
pins: 1, 2, 3, 4, 5, 6, 7, 8, 9, 10

## 691701350012B
designator P?  (value not drawn)
WR-TBL Series 7013 Horizontal PCB Header with Flanges, SMT, pitch 3.81mm, 12p; Manufacturer: Wurth Elektronik; Insulator Material: LCP; Modularity: No; Rated Current (cULus): 10A; Rated Current (VDE): 8A; Working Voltage (cULus): 300V (AC); Working Voltage (VDE): 250V (AC); Withstanding Voltage (cULus): 1600V (AC); Withstanding Voltage (VDE): 1400V (AC); Manufacturer Part Number: 691701350012B; Product Series: WR-TBL; ComponentLink1Description: Website Link; ComponentLink1URL: https://www.we-online.com; ComponentLink2Description: Datasheet Link; ComponentLink2URL: https://www.we-online.com/components/products/datasheet/691701350012B; Mount: Surface Mount; Operating Temperature Min: -40degC; Operating Temperature Max: 130degC; Packaging: Box; Application: Pluggable; Number of Pins: 12; Number of Rows: 1; Orientation: Horizontal; Lead Pitch: 3.81mm
footprint 691701350012B
pins: 1, 2, 3, 4, 5, 6, 7, 8, 9, 10, 11, 12

## 691701500002B
designator P?  (value not drawn)
WR-TBL Series 7015B Open Vertical PCB Header, SMT, pitch 5.08mm, 02p; Manufacturer: Wurth Elektronik; Modularity: No; Rated Current: 10A; Working Voltage: 300V (AC); Manufacturer Part Number: 691701500002B; Product Series: WR-TBL; ComponentLink1Description: Website Link; ComponentLink1URL: https://www.we-online.com; ComponentLink2Description: Datasheet Link; ComponentLink2URL: https://www.we-online.com/components/products/datasheet/691701500002B; Mount: Surface Mount; Operating Temperature Min: -40degC; Operating Temperature Max: 130degC; Packaging: Box; Application: Pluggable; Number of Pins: 2; Number of Rows: 1; Orientation: Vertical; Lead Pitch: 5.08mm
footprint 691701500002B
pins: 1, 2

## 691701500003B
designator P?  (value not drawn)
WR-TBL Series 7015B Open Vertical PCB Header, SMT, pitch 5.08mm, 03p; Manufacturer: Wurth Elektronik; Modularity: No; Rated Current: 10A; Working Voltage: 300V (AC); Manufacturer Part Number: 691701500003B; Product Series: WR-TBL; ComponentLink1Description: Website Link; ComponentLink1URL: https://www.we-online.com; ComponentLink2Description: Datasheet Link; ComponentLink2URL: https://www.we-online.com/components/products/datasheet/691701500003B; Mount: Surface Mount; Operating Temperature Min: -40degC; Operating Temperature Max: 130degC; Packaging: Box; Application: Pluggable; Number of Pins: 3; Number of Rows: 1; Orientation: Vertical; Lead Pitch: 5.08mm
footprint 691701500003B
pins: 1, 2, 3

## 691701500004B
designator P?  (value not drawn)
WR-TBL Series 7015B Open Vertical PCB Header, SMT, pitch 5.08mm, 04p; Manufacturer: Wurth Elektronik; Modularity: No; Rated Current: 10A; Working Voltage: 300V (AC); Manufacturer Part Number: 691701500004B; Product Series: WR-TBL; ComponentLink1Description: Website Link; ComponentLink1URL: https://www.we-online.com; ComponentLink2Description: Datasheet Link; ComponentLink2URL: https://www.we-online.com/components/products/datasheet/691701500004B; Mount: Surface Mount; Operating Temperature Min: -40degC; Operating Temperature Max: 130degC; Packaging: Box; Application: Pluggable; Number of Pins: 4; Number of Rows: 1; Orientation: Vertical; Lead Pitch: 5.08mm
footprint 691701500004B
pins: 1, 2, 3, 4

## 691701500005B
designator P?  (value not drawn)
WR-TBL Series 7015B Open Vertical PCB Header, SMT, pitch 5.08mm, 05p; Manufacturer: Wurth Elektronik; Modularity: No; Rated Current: 10A; Working Voltage: 300V (AC); Manufacturer Part Number: 691701500005B; Product Series: WR-TBL; ComponentLink1Description: Website Link; ComponentLink1URL: https://www.we-online.com; ComponentLink2Description: Datasheet Link; ComponentLink2URL: https://www.we-online.com/components/products/datasheet/691701500005B; Mount: Surface Mount; Operating Temperature Min: -40degC; Operating Temperature Max: 130degC; Packaging: Box; Application: Pluggable; Number of Pins: 5; Number of Rows: 1; Orientation: Vertical; Lead Pitch: 5.08mm
footprint 691701500005B
pins: 1, 2, 3, 4, 5

## 691701500006B
designator P?  (value not drawn)
WR-TBL Series 7015B Open Vertical PCB Header, SMT, pitch 5.08mm, 06p; Manufacturer: Wurth Elektronik; Modularity: No; Rated Current: 10A; Working Voltage: 300V (AC); Manufacturer Part Number: 691701500006B; Product Series: WR-TBL; ComponentLink1Description: Website Link; ComponentLink1URL: https://www.we-online.com; ComponentLink2Description: Datasheet Link; ComponentLink2URL: https://www.we-online.com/components/products/datasheet/691701500006B; Mount: Surface Mount; Operating Temperature Min: -40degC; Operating Temperature Max: 130degC; Packaging: Box; Application: Pluggable; Number of Pins: 6; Number of Rows: 1; Orientation: Vertical; Lead Pitch: 5.08mm
footprint 691701500006B
pins: 1, 2, 3, 4, 5, 6